# Altium footprint library Batterie_footprint.PcbLib: 69 footprints (part 5 of 5)
Each footprint in its own frame and in the unit in brackets; x right, y up, seen from the top. Pads: shape width x height; smd on the part's side, far side on the other; paste and mask are expansions set on the pad; w line width, h text height; cw(c..) or ccw(c..) is an arc to the next point about the centre after c.
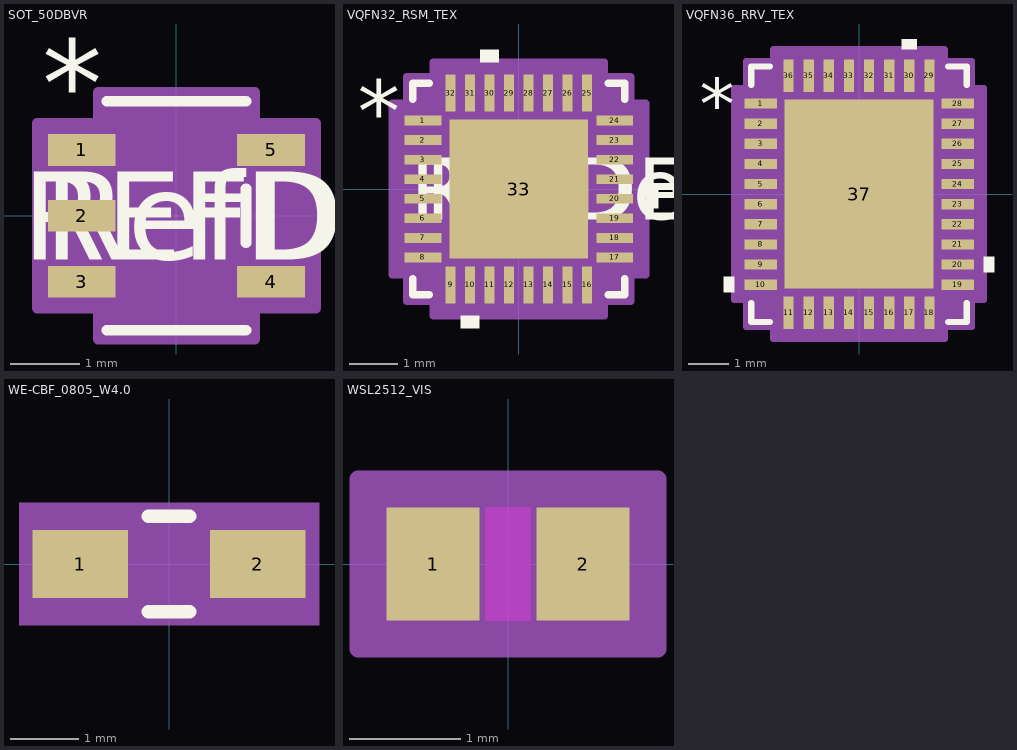
[diagram p4: the footprints below, top view; thin cyan lines are the x and y axes]

## SOT_50DBVR [mil]
pads (5):
  rect 38.5x18 smd paste+0 mask+0: 1(-53.75,37.4) 2(-53.75,0) 3(-53.75,-37.4) 4(53.75,-37.4) 5(53.75,37.4)
Top Overlay:
  lines w6: -39.5,-65 39.5,-65 ; -39.5,65 39.5,65 ; 39.5,-15.3 39.5,15.3
  text "REFDES" at -87.5,-25 h50
  text "*" at -76.25,50.4 h50
  text "RefDes" at -75,-25 h50
Mechanical 13:
  lines w0: -12,60 ccw(c0,60) 12,60
  lines w1: -59,-47.4 -59,-27.4 -34.5,-27.4 -34.5,-47.4 -59,-47.4 ; -59,-10 -59,10 -34.5,10 -34.5,-10 -59,-10 ; -59,27.4 -59,47.4 -34.5,47.4 -34.5,27.4 -59,27.4 ; -34.5,-60 34.5,-60 34.5,60 -34.5,60 -34.5,-60 ; 34.5,-47.4 34.5,-27.4 59,-27.4 59,-47.4 34.5,-47.4 ; 34.5,27.4 34.5,47.4 59,47.4 59,27.4 34.5,27.4
  text "*" at -37,7.4 h50
  text "RefDes2" at -87.5,-25 h50
Mechanical 15:
  region: 44.5,-70 -44.5,-70 -44.5,-52.4 -79,-52.4 -79,52.4 -44.5,52.4 -44.5,70 44.5,70 44.5,52.4 79,52.4 79,-52.4 44.5,-52.4
  lines w6: -79,-52.4 -44.5,-52.4 -44.5,-70 44.5,-70 44.5,-52.4 79,-52.4 79,52.4 44.5,52.4 44.5,70 -44.5,70 -44.5,52.4 -79,52.4 -79,-52.4
3D body "SOT_50DBVR.step": height 57.09, standoff 0, extent -59.02,-60 59.02,60

## VQFN32_RSM_TEX [mm]
pads (33):
  rect 0.757x0.204 smd paste+0 mask+0: 1(-1.966,1.4) 2(-1.966,1) 3(-1.966,0.6) 4(-1.966,0.2) 5(-1.966,-0.2) 6(-1.966,-0.6) 7(-1.966,-1) 8(-1.966,-1.4) 17(1.966,-1.4) 18(1.966,-1) 19(1.966,-0.6) 20(1.966,-0.2) 21(1.966,0.2) 22(1.966,0.6) 23(1.966,1) 24(1.966,1.4)
  rect 0.204x0.757 smd paste+0 mask+0: 9(-1.4,-1.966) 10(-1,-1.966) 11(-0.6,-1.966) 12(-0.2,-1.966) 13(0.2,-1.966) 14(0.6,-1.966) 15(1,-1.966) 16(1.4,-1.966) 25(1.4,1.966) 26(1,1.966) 27(0.6,1.966) 28(0.2,1.966) 29(-0.2,1.966) 30(-0.6,1.966) 31(-1,1.966) 32(-1.4,1.966)
  rect 2.845x2.845 smd paste-1.422 mask+0: 33(0,0)
Top Overlay:
  region: -0.81,-2.599 -1.191,-2.599 -1.191,-2.853 -0.81,-2.853
  region: 2.599,-0.009 2.853,-0.009 2.853,-0.39 2.599,-0.39
  region: -0.409,2.599 -0.79,2.599 -0.79,2.853 -0.409,2.853
  lines w0.152: -2.172,-1.835 -2.172,-2.172 -1.835,-2.172 ; -2.172,1.835 -2.172,2.172 -1.835,2.172 ; 1.835,-2.172 2.172,-2.172 2.172,-1.835 ; 1.835,2.172 2.172,2.172 2.172,1.835
  text "*" at -3.297,0.965 h1.27
  text "RefDes" at -1.905,-0.635 h1.27
  text "REFDES" at -2.222,-0.635 h1.27
Top Paste:
  region: -0.1,1.322 -1.322,1.322 -1.322,0.1 -0.1,0.1
  region: -0.1,-0.1 -1.322,-0.1 -1.322,-1.322 -0.1,-1.322
  region: 1.322,1.322 0.1,1.322 0.1,0.1 1.322,0.1
  region: 1.322,-0.1 0.1,-0.1 0.1,-1.322 1.322,-1.322
Mechanical 13:
  lines w0.025: -2.045,0.775 -0.775,2.045 ; -2.045,-2.045 2.045,-2.045 2.045,2.045 -2.045,2.045 -2.045,-2.045 ; -2.045,-1.527 -2.045,-1.273 -2.045,-1.527 ; -2.045,-1.127 -2.045,-0.873 -2.045,-1.127 ; -2.045,-0.727 -2.045,-0.473 -2.045,-0.727 ; -2.045,-0.327 -2.045,-0.073 -2.045,-0.327 ; -2.045,0.073 -2.045,0.327 -2.045,0.073 ; -2.045,0.473 -2.045,0.727 -2.045,0.473 ; -2.045,0.873 -2.045,1.127 -2.045,0.873 ; -2.045,1.273 -2.045,1.527 -2.045,1.273 ; -1.527,-2.045 -1.273,-2.045 -1.527,-2.045 ; -1.527,2.045 -1.273,2.045 -1.527,2.045 ; -1.127,-2.045 -0.873,-2.045 -1.127,-2.045 ; -1.127,2.045 -0.873,2.045 -1.127,2.045 ; -0.727,-2.045 -0.473,-2.045 -0.727,-2.045 ; -0.727,2.045 -0.473,2.045 -0.727,2.045 ; -0.327,-2.045 -0.073,-2.045 -0.327,-2.045 ; -0.327,2.045 -0.073,2.045 -0.327,2.045 ; 0.073,-2.045 0.327,-2.045 0.073,-2.045 ; 0.073,2.045 0.327,2.045 0.073,2.045 ; 0.473,-2.045 0.727,-2.045 0.473,-2.045 ; 0.473,2.045 0.727,2.045 0.473,2.045 ; 0.873,-2.045 1.127,-2.045 0.873,-2.045 ; 0.873,2.045 1.127,2.045 0.873,2.045 ; 1.273,-2.045 1.527,-2.045 1.273,-2.045 ; 1.273,2.045 1.527,2.045 1.273,2.045 ; 2.045,-1.527 2.045,-1.273 2.045,-1.527 ; 2.045,-1.127 2.045,-0.873 2.045,-1.127 ; 2.045,-0.727 2.045,-0.473 2.045,-0.727 ; 2.045,-0.327 2.045,-0.073 2.045,-0.327 ; 2.045,0.073 2.045,0.327 2.045,0.073 ; 2.045,0.473 2.045,0.727 2.045,0.473 ; 2.045,0.873 2.045,1.127 2.045,0.873 ; 2.045,1.273 2.045,1.527 2.045,1.273
  text "*" at -1.905,0.965 h1.27
  text "RefDes2" at -2.222,-0.635 h1.27
Mechanical 15:
  region: -1.756,-2.299 -2.299,-2.299 -2.299,-1.756 -2.599,-1.756 -2.599,1.756 -2.299,1.756 -2.299,2.299 -1.756,2.299 -1.756,2.599 1.756,2.599 1.756,2.299 2.299,2.299 2.299,1.756 2.599,1.756 2.599,-1.756 2.299,-1.756 2.299,-2.299 1.756,-2.299 1.756,-2.599 -1.756,-2.599
  lines w0.152: -2.599,-1.756 -2.299,-1.756 -2.299,-2.299 -1.756,-2.299 -1.756,-2.599 1.756,-2.599 1.756,-2.299 2.299,-2.299 2.299,-1.756 2.599,-1.756 2.599,1.756 2.299,1.756 2.299,2.299 1.756,2.299 1.756,2.599 -1.756,2.599 -1.756,2.299 -2.299,2.299 -2.299,1.756 -2.599,1.756 -2.599,-1.756
3D body "VQFN32_RSM_TEX.step": height 0.99, standoff 0, extent -2.045,-2.045 2.045,2.045

## VQFN36_RRV_TEX [mil]
pads (37):
  rect 31.81x10.03 smd paste+0 mask+0: 1(-96.41,88.61) 2(-96.41,68.92) 3(-96.41,49.23) 4(-96.41,29.54) 5(-96.41,9.85) 6(-96.41,-9.85) 7(-96.41,-29.54) 8(-96.41,-49.23) 9(-96.41,-68.92) 10(-96.41,-88.61) 19(96.41,-88.61) 20(96.41,-68.92) 21(96.41,-49.23) 22(96.41,-29.54) 23(96.41,-9.85) 24(96.41,9.85) 25(96.41,29.54) 26(96.41,49.23) 27(96.41,68.92) 28(96.41,88.61)
  rect 10.03x31.81 smd paste+0 mask+0: 11(-68.92,-115.91) 12(-49.23,-115.91) 13(-29.54,-115.91) 14(-9.85,-115.91) 15(9.85,-115.91) 16(29.54,-115.91) 17(49.23,-115.91) 18(68.92,-115.91) 29(68.92,115.91) 30(49.23,115.91) 31(29.54,115.91) 32(9.85,115.91) 33(-9.85,115.91) 34(-29.54,115.91) 35(-49.23,115.91) 36(-68.92,115.91)
  rect 146x185 smd paste+0 mask+0: 37(0,0)
Top Overlay:
  region: -122.31,-81.11 -132.31,-81.11 -132.31,-96.11 -122.31,-96.11
  region: 122.31,-61.41 132.31,-61.41 132.31,-76.42 122.31,-76.42
  region: 56.73,141.81 41.73,141.81 41.73,151.81 56.73,151.81
  lines w6: -105.5,-106.72 -105.5,-125 -87.03,-125 ; -105.5,106.72 -105.5,125 -87.03,125 ; 87.03,-125 105.5,-125 105.5,-106.72 ; 87.03,125 105.5,125 105.5,106.72
  text "*" at -155.81,63.6 h50
  text ".Designator" at -137.5,-25 h50
Mechanical 13:
  lines w1: -100.5,70 -50.5,120 ; -100.5,-120 100.5,-120 100.5,120 -100.5,120 -100.5,-120 ; -100.5,-94.61 -100.5,-82.61 -100.5,-94.61 ; -100.5,-74.92 -100.5,-62.91 -100.5,-74.92 ; -100.5,-55.23 -100.5,-43.23 -100.5,-55.23 ; -100.5,-35.53 -100.5,-23.54 -100.5,-35.53 ; -100.5,-15.85 -100.5,-3.85 -100.5,-15.85 ; -100.5,3.85 -100.5,15.85 -100.5,3.85 ; -100.5,23.54 -100.5,35.53 -100.5,23.54 ; -100.5,43.23 -100.5,55.23 -100.5,43.23 ; -100.5,62.91 -100.5,74.92 -100.5,62.91 ; -100.5,82.61 -100.5,94.61 -100.5,82.61 ; -74.92,-120 -62.91,-120 -74.92,-120 ; -74.92,120 -62.91,120 -74.92,120 ; -55.23,-120 -43.23,-120 -55.23,-120 ; -55.23,120 -43.23,120 -55.23,120 ; -35.53,-120 -23.54,-120 -35.53,-120 ; -35.53,120 -23.54,120 -35.53,120 ; -15.85,-120 -3.85,-120 -15.85,-120 ; -15.85,120 -3.85,120 -15.85,120 ; 3.85,-120 15.85,-120 3.85,-120 ; 3.85,120 15.85,120 3.85,120 ; 23.54,-120 35.53,-120 23.54,-120 ; 23.54,120 35.53,120 23.54,120 ; 43.23,-120 55.23,-120 43.23,-120 ; 43.23,120 55.23,120 43.23,120 ; 62.91,-120 74.92,-120 62.91,-120 ; 62.91,120 74.92,120 62.91,120 ; 100.5,-94.61 100.5,-82.61 100.5,-94.61 ; 100.5,-74.92 100.5,-62.91 100.5,-74.92 ; 100.5,-55.23 100.5,-43.23 100.5,-55.23 ; 100.5,-35.53 100.5,-23.54 100.5,-35.53 ; 100.5,-15.85 100.5,-3.85 100.5,-15.85 ; 100.5,3.85 100.5,15.85 100.5,3.85 ; 100.5,23.54 100.5,35.53 100.5,23.54 ; 100.5,43.23 100.5,55.23 100.5,43.23 ; 100.5,62.91 100.5,74.92 100.5,62.91 ; 100.5,82.61 100.5,94.61 100.5,82.61
  text ".Designator" at -137.5,-25 h50
  text "*" at -62,63.6 h50
Mechanical 15:
  region: -83.93,-130 -110.5,-130 -110.5,-103.62 -122.31,-103.62 -122.31,103.62 -110.5,103.62 -110.5,130 -83.93,130 -83.93,141.81 83.93,141.81 83.93,130 110.5,130 110.5,103.62 122.31,103.62 122.31,-103.62 110.5,-103.62 110.5,-130 83.93,-130 83.93,-141.81 -83.93,-141.81
  lines w6: -122.31,-103.62 -110.5,-103.62 -110.5,-130 -83.93,-130 -83.93,-141.81 83.93,-141.81 83.93,-130 110.5,-130 110.5,-103.62 122.31,-103.62 122.31,103.62 110.5,103.62 110.5,130 83.93,130 83.93,141.81 -83.93,141.81 -83.93,130 -110.5,130 -110.5,103.62 -122.31,103.62 -122.31,-103.62
3D body "VQFN36_RRV_TEX.step": height 39.09, standoff 0, extent -100.51,-120 100.51,120

## WE-CBF_0805_W4.0 [mm]
pads (2):
  rect 1.4x1 smd: 1(-1.3,0) 2(1.3,0)
Top Overlay:
  lines w0.2: -0.3,-0.7 0.3,-0.7 ; -0.3,0.7 0.3,0.7
Mechanical 13:
  lines w0.1: -1,-0.6 -1,0.6 1,0.6 1,-0.6 -1,-0.6
Mechanical 15:
  region: 2.2,-0.9 -2.2,-0.9 -2.2,0.9 2.2,0.9

## WSL2512_VIS [mil]
pads (2):
  rect 33x40 smd paste+0 mask+0: 1(-26.5,0) 2(26.5,0)
Top Layer keep-out:
  region: -8,-18 -8,18 8,18 8,-18
Top Overlay:
  text ".Designator" at -137.5,-25 h50
Keep-Out Layer:
  region: -8,-20 -8,20 8,20 8,-20
Mechanical 13:
  lines w1: -35,-20 -35,20 ; -35,-20 -10,-20 -10,20 -35,20 ; -35,-20 35,-20 ; -35,-20 -35,20 ; -35,20 35,20 ; 35,-20 10,-20 10,20 35,20 ; 35,-20 35,20 ; 35,-20 35,20
  text ".Designator" at -137.5,-25 h50
Mechanical 15:
  region: 53,-30 -53,-30 -53,30 53,30
  lines w6: -53,-30 -53,30 53,30 53,-30 -53,-30
3D body "WSL2512_VIS.step": height 17.99, standoff 0, extent -35,-20 35,20